# Altium schematic symbol library DRV8701E_CSD87350Q5D.SCHLIB: 24 symbols
Pins are listed as number, name and electrical type; pins without a type are passive.

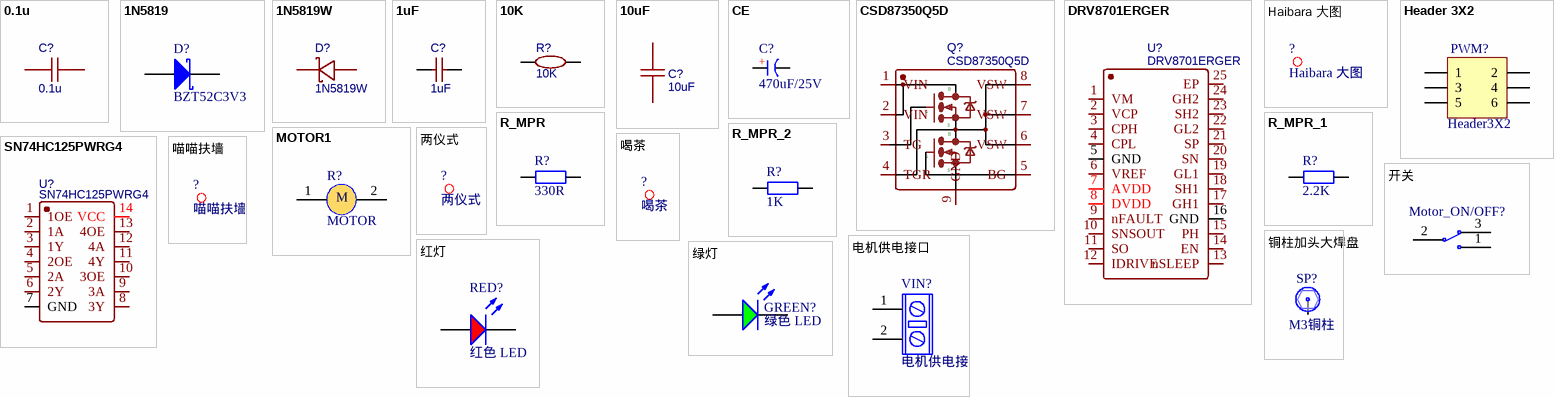
[diagram p0: symbols 0.1u to 铜柱加头大焊盘]

## 0.1u
designator C?
nameAlias: Value(F); Contributor: LCEDA_Lib; spicePre: C; spiceSymbolName: C_0603_US
footprint C0603
pins: 1, 2

## 1N5819
designator D?, comment BZT52C3V3
肖特基二极管; 淘宝ID: 封装库来自淘宝 ID：黄晶宝石; 属性: 40V/2A; BOM名称: 肖特基二极管; 欢迎光临: https://shop463601444.taobao.com
footprint SOD-323 (1.8x1.3X0.9mm（长宽高，不包括引脚）)
pins: 1 A, 2 K

## 1N5819W
designator D?
BOM_Manufacturer: Shandong Jingdao Microelectronics; Contributor: LCSC; BOM_Supplier: LCSC; BOM_Supplier Part: C169540; BOM_Manufacturer Part: 1N5819W; BOM_JLCPCB Part Class: Extended Part; spicePre: D; spiceSymbolName: 1N5819W
footprint SOD-123F_L2.8-W1.8-LS3.7-RD
pins: 1, 2

## 1uF
designator C?
BOM_Manufacturer Part: CL10B105KO8NNNC; BOM_Manufacturer: SAMSUNG; nameAlias: Capacitance; BOM_Supplier: LCSC; BOM_Supplier Part: C59782; BOM_JLCPCB Part Class: Extended Part; spicePre: C; spiceSymbolName: CL10B105KO8NNNC
footprint C0603
pins: 1, 2

## 10K
designator R?
BOM_Manufacturer: YAGEO; BOM_Manufacturer Part: RT0603BRD0710KL; nameAlias: Resistance (Ohms); Resistance: 10kΩ; BOM_Supplier: LCSC; BOM_Supplier Part: C95204; BOM_JLCPCB Part Class: Extended Part; spicePre: R; spiceSymbolName: RT0603BRD0710KL
footprint R0603
pins: 1, 2

## 10uF
designator C?
BOM_Manufacturer: Huaxin S&T; BOM_Manufacturer Part: 0805F106Z160CT; nameAlias: Capacitance; Contributor: LCSC; BOM_Supplier: LCSC; BOM_Supplier Part: C303921; BOM_JLCPCB Part Class: Extended Part; spicePre: C; spiceSymbolName: 0805F106Z160CT
footprint C0805
pins: 1, 2

## CE
designator C?, comment 470uF/25V
footprint CAP 3.5*8*11.5 - BK (脚距3.5mm直径8mm高度11.5mm)
footprint CS 5.0*10*13 - V (脚距5mm , 直径10mm , 高13mm)
pins: 1 A, 2 K
text: +

## CSD87350Q5D
designator Q?
BOM_Manufacturer: Texas Instruments; Contributor: LCSC; BOM_Supplier: LCSC; BOM_Supplier Part: C140356; BOM_Manufacturer Part: CSD87350Q5D; BOM_JLCPCB Part Class: Extended Part; spicePre: Q; spiceSymbolName: CSD87350Q5D
footprint LSON-8_L6.0-W5.0-P1.27-LS6.0-TL-EP
pins: 1 VIN, 2 VIN, 3 TG, 4 TGR, 5 BG, 6 VSW, 7 VSW, 8 VSW, 9 GND
text: D; G; S

## DRV8701ERGER
designator U?
BOM_Manufacturer: Texas Instruments; Contributor: LCSC; BOM_Supplier: LCSC; BOM_Supplier Part: C90964; BOM_Manufacturer Part: DRV8701ERGER; BOM_JLCPCB Part Class: Extended Part; spicePre: U; spiceSymbolName: DRV8701ERGER
footprint VQFN-24_L4.0-W4.0-P0.50-BL-EP2.8
pins: 1 VM, 2 VCP, 3 CPH, 4 CPL, 5 GND, 6 VREF, 7 AVDD, 8 DVDD, 9 nFAULT, 10 SNSOUT, 11 SO, 12 IDRIVE, 13 nSLEEP, 14 EN, 15 PH, 16 GND, 17 GH1, 18 SH1, 19 GL1, 20 SN, 21 SP, 22 GL2, 23 SH2, 24 GH2, 25 EP

## Haibara 大图
designator ?
footprint Haibara大图阻焊
footprint Haibara大图丝印

## Header 3X2
designator PWM?, comment Header3X2
3*2P接插件; 版权归属: 封装库来自淘宝 ID：黄晶宝石; BOM名称: 3*2P接插件; 学习资源: https://shop463601444.taobao.com
footprint MX 1.25-WS-6P (长：12.65mm，宽：4.2mm，高：3.4mm)
footprint MX 1.25-WS-6P (长：12.65mm，宽：4.2mm，高：3.4mm)
pins: 1, 2, 3, 4, 5, 6

## MOTOR1
designator R?, comment MOTOR
footprint 5.08 2P 螺钉端子 (Terminal Block, 17.5A 400V, Pitch 5.08mm, 2 Positions, Screw Connection)
footprint XT30 母头 电源插头
pins: 1 (power), 2 (power)
text: M

## R_MPR
designator R?, comment 330R
5W无感水泥电阻; BOM名称: 大功率电阻; 版权归属: 封装库来自淘宝 ID：黄晶宝石; 联系售后: https://shop463601444.taobao.com
footprint RX10-18*15*5 (18*15*5MM(长*宽*厚))
footprint R 0603_M
footprint R 0603_L
footprint R 0603
footprint R0603
pins: 1, 2

## R_MPR_1
designator R?, comment 2.2K
5W无感水泥电阻; BOM名称: 大功率电阻; 版权归属: 封装库来自淘宝 ID：黄晶宝石; 联系售后: https://shop463601444.taobao.com
footprint RX10-18*15*5 (18*15*5MM(长*宽*厚))
footprint R 0603_M
footprint R 0603_L
footprint R 0603
footprint R0603
pins: 1, 2

## R_MPR_2
designator R?, comment 1K
5W无感水泥电阻; BOM名称: 大功率电阻; 版权归属: 封装库来自淘宝 ID：黄晶宝石; 联系售后: https://shop463601444.taobao.com
footprint RX10-18*15*5 (18*15*5MM(长*宽*厚))
footprint R 0603_M
footprint R 0603_L
footprint R 0603
footprint R0603
pins: 1, 2

## SN74HC125PWRG4
designator U?
BOM_Manufacturer: TI(德州仪器); Contributor: LCSC; BOM_Supplier: LCSC; BOM_Supplier Part: C2676184; BOM_Manufacturer Part: SN74HC125PWRG4; BOM_JLCPCB Part Class: Extended Part; spicePre: U; spiceSymbolName: SN74HC125PWRG4
footprint TSSOP-14_L5.0-W4.4-P0.65-LS6.4-TL
pins: 1 1OE, 2 1A, 3 1Y, 4 2OE, 5 2A, 6 2Y, 7 GND, 8 3Y, 9 3A, 10 3OE, 11 4Y, 12 4A, 13 4OE, 14 VCC

## 两仪式
designator ?
footprint 两仪式
footprint 两仪式

## 喝茶
designator ?
footprint 喝茶

## 喵喵扶墙
designator ?
footprint IMPORTED_IMAGE - duplicate5

## 开关
designator Motor_ON/OFF?  (value not drawn)
footprint 小船开关
footprint MTS-102S 两档纽子开关 (MTS10系列3脚扭子开关)
pins: 1 (power), 2 (power), 3 (power)

## 电机供电接口
designator VIN?
footprint XT30 母头 电源插头
footprint XT60 母头 电源接口
pins: 1, 2

## 红灯
designator RED?, comment 红色 LED
发光二极管; ComponentLink1Description: 供应商链接; ComponentLink1URL: http://www.szlcsc.com/product/details_2668.html; Package: 0805; Supplier: LC; SuppliersPartNumber: C2295
footprint 0603 LED R
pins: 1, 2

## 绿灯
designator GREEN?, comment 绿色 LED
发光二极管; ComponentLink1Description: 供应商链接; ComponentLink1URL: http://www.szlcsc.com/product/details_2670.html; Package: 0805; Supplier: LC; SuppliersPartNumber: C2297
footprint 0603 LED G (Kingbright,1608,LED,400 mcd 120*)
pins: 1, 2

## 铜柱加头大焊盘
designator SP?, comment M3铜柱
铜柱; 版权归属: 源创客; BOM名称: 铜柱; 学习资源: www.ooocke.com
footprint MTGP720H320V6P - duplicate
pins: 1